# Altium footprint library utils.PcbLib: 7 footprints
Each footprint in its own frame and in the unit in brackets; x right, y up, seen from the top. Pads: shape width x height; smd on the part's side, far side on the other; paste and mask are expansions set on the pad; w line width, h text height; cw(c..) or ccw(c..) is an arc to the next point about the centre after c.
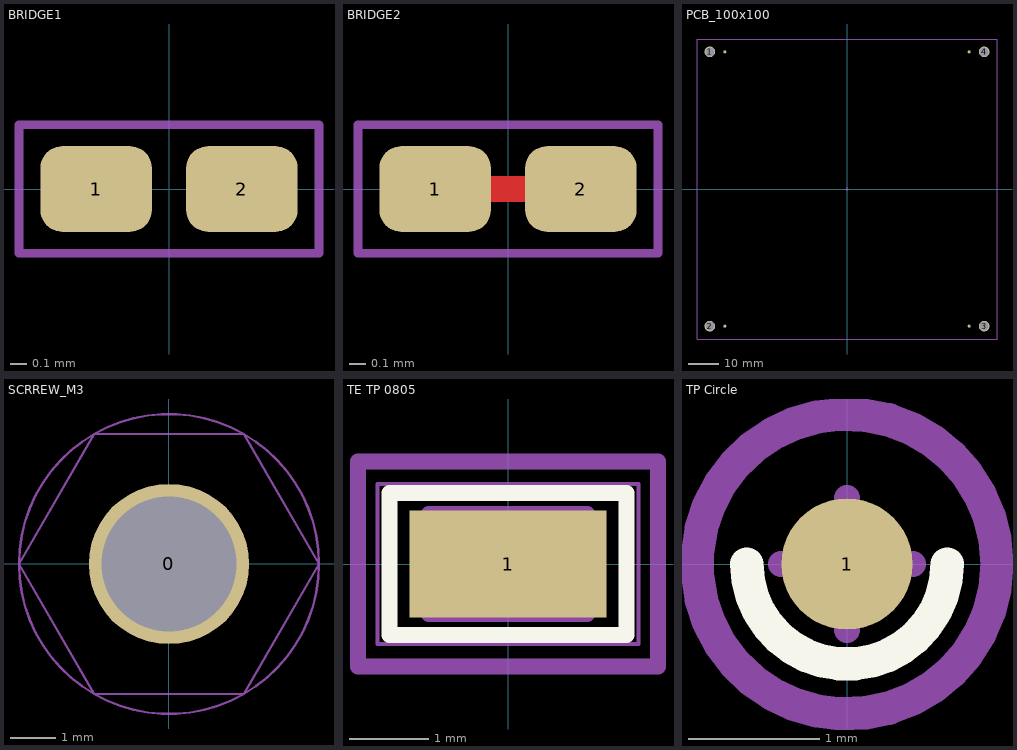
[diagram p0: the footprints below, top view; thin cyan lines are the x and y axes]

## 3D_SCREW_M3_8 [mil]
3D body "User Library-M3x0_5xL Phillips Panhead Screw7mm.STEP": height 93.73, standoff -275.59, extent -110.23,-110.23 110.24,110.25

## BRIDGE1 [mil]
pads (2):
  rrect50% 26x20 smd: 1(-17,0) 2(17,0)
Top Solder:
  region: 25,12 -25,12 -26.39,12 -28.96,10.94 -30.94,8.97 -32,6.39 -32,5 -32,-5 -32,-6.39 -30.94,-8.97 -28.97,-10.94 -26.39,-12 -25,-12 25,-12 26.39,-12 28.96,-10.94 30.93,-8.97 32,-6.39 32,-5 32,5 32,6.39 30.93,8.96 28.96,10.93 26.39,12
Top Component:
  lines w2: -35,-15 35,-15 35,15 -35,15 -35,-15
  text ".Designator" at -8,-6 h20

## BRIDGE2 [mil]
pads (2):
  rrect50% 26x20 smd: 1(-17,0) 2(17,0)
Top Layer:
  lines w6: -17,0 17,0
Top Solder:
  region: 25,12 -25,12 -26.39,12 -28.96,10.94 -30.94,8.97 -32,6.39 -32,5 -32,-5 -32,-6.39 -30.94,-8.97 -28.97,-10.94 -26.39,-12 -25,-12 25,-12 26.39,-12 28.96,-10.94 30.93,-8.97 32,-6.39 32,-5 32,5 32,6.39 30.93,8.96 28.96,10.93 26.39,12
Top Component:
  lines w2: -35,-15 35,-15 35,15 -35,15 -35,-15
  text ".Designator" at -8,-6 h20

## PCB_100x100 [mil]
pads (8):
  round 39.37 smd mask+39.37: 0(-1603.15,1800) 0(-1603.15,-1800) 0(1603.15,-1800) 0(1603.15,1800)
  round 140 hole 120 mask+0: 1(-1800,1800) 2(-1800,-1800) 3(1800,-1800) 4(1800,1800)
Mechanical 1:
  lines w1: -1968.5,-1968.5 1968.5,-1968.5 1968.5,1968.5 -1968.5,1968.5 -1968.5,-1968.5
Bottom Component:
  lines w2: -20,0 20,0 ; 0,-20 0,20

## SCRREW_M3 [mil]
height 396
pads (1):
  round 140 hole 118 mask+0: 0(0,0)
Mechanical 13:
  circle w2: c0,0 r130.98
  lines w2: -130.98,0 -65.49,113.43 65.49,113.43 130.98,0 65.49,-113.43 -65.49,-113.43 -130.98,0
Top Component:
  circle w2: c0,0 r130.98

## TE TP 0805 [mm]
height 1.45
pads (1):
  rect 2.5x1.35 smd: 1(0,0)
Top Overlay:
  lines w0.2: -1.5,-0.9 -1.5,0.9 1.5,0.9 1.5,-0.9 -1.5,-0.9
Mechanical 1:
  lines w0.2: -1,-0.637 1,-0.637 1,0.638 -1,0.638 -1,-0.637
Top Component:
  lines w0.051: -1.651,-1.016 -1.651,1.016 1.651,1.016 1.651,-1.016 -1.651,-1.016
  text ".Designator" at -0.406,-0.279 h1.02
Component Center:
  lines w0.2: -0.5,0 0.5,0 ; 0,-0.5 0,0.5 ; -1.9,-1.3 -1.9,1.3 1.9,1.3 1.9,-1.3 -1.9,-1.3
3D body "TE RCT-0C.STEP": height 1.48, standoff 0.03, extent -1,-0.637 1,0.638

## TP Circle [mm]
height 1.45
pads (1):
  round 1 smd: 1(0,0)
Top Overlay:
  lines w0.254: -0.762,0 ccw(c0,0) 0.762,0
Top Component:
  lines w0.051: -0.779,0 ccw(c0,0) 0.779,0
  text ".Designator" at -0.305,-0.203 h0.76
Component Center:
  circle w0.254: c0,0 r1.142
  lines w0.2: -0.5,0 0.5,0 ; 0,-0.5 0,0.5